# Altium schematic symbol library Tantalum_Capacitor_1206_A.SchLib: 1 symbol
Pins are listed as number, name and electrical type; pins without a type are passive.

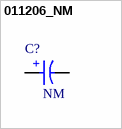
[diagram p0: symbol 011206_NM]

## 011206_NM
designator C?, comment NM
CAP TANT NM 1206; ComponentLink1Description: Datasheet; ComponentLink1URL: N/A; Capacitance: N/A; Supplier 1 URL: N/A; Supplier 2 URL: N/A; Supplier 3 URL: N/A; Value: NM; Rated Voltage: N/A; LCSC Part #: N/A; Manufacturer Part Number: N/A; Manufacturer: N/A; Mount: SMD/SMT; Operating Temperature Max: + 125 C; Operating Temperature Min: - 55 C; Package / Case: 1206; Packaging: Tape and Reel; Supplier 1 Part Number: N/A; Supplier 1: Mouser; Supplier 2 Part Number: N/A; Supplier 2: Digi-Key; Supplier 3 Part Number: N/A; Supplier 3: thegioiic; Tolerance: N/A; ESR: N/A; Leakage Current: N/A
footprint 1206_A (Molded Capacitor, 2-Leads, Body 3.20x1.50mm, IPC Medium Density)
pins: 1 P, 2 N
text: +